# EAGLE library part NL27WZ14 (library madhu)
Dual Schmitt-Trigger Inverter Datasheet <https://www.onsemi.com/pdf/datasheet/nl27wz14-d.pdf>
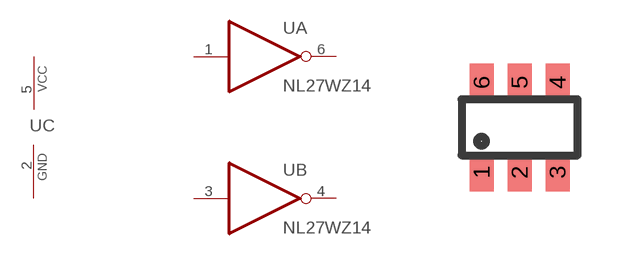
[diagram p38: symbol with the pads of TSOP6; footprint TSOP6]

Designator prefix U; gates A=INVERTER B=INVERTER C=PWRN

## NL27WZ14DTT1G  [TSOP6]
1  A:I  in
2  C:GND  pwr
3  B:I  in
4  B:O  out
5  C:VCC  pwr
6  A:O  out

## Footprint TSOP6 (pad centres in mm)
Small Outline Transistor; 6 leads Reflow soldering
smd 0.6 x 0.95: 1 -0.95,-1.125; 2 0,-1.125; 3 0.95,-1.125; 4 0.95,1.125; 5 0,1.125; 6 -0.95,1.125